# Altium integrated library VIETTIEN.IntLib: 194 symbols (part 7 of 9)

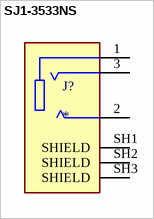
[diagram p138: symbol SJ1-3533NS]

## SJ1-3533NS
designator J?
3.50mm (0.141, 1/8, Mini Plug) - Headphone Phone Jack Stereo (3 Conductor, TRS) Connector Solder; MF: Same Sky; MP: SJ1-3533NS; SnapEDA_Link: https://www.snapeda.com/parts/SJ1-3533NS/Same+Sky/view-part/?ref=snap; Package: None; Value: *; Check_prices: https://www.snapeda.com/parts/SJ1-3533NS/Same+Sky/view-part/?ref=eda
footprint CUI_SJ1-3533NS
pins: 1, 2, 3, SH1 SHIELD, SH2 SHIELD, SH3 SHIELD


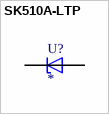
[diagram p139: symbol SK510A-LTP]

## SK510A-LTP
designator U?
Diode Schottky 100 V 5A Surface Mount DO-214AC (SMA)
footprint SK510A-LTP
pins: 1, 2


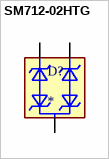
[diagram p140: symbol SM712-02HTG]

## SM712-02HTG
designator D?
TVS Diode, SM712 Series, 31V Clamp, 600W Peak Pulse, Surface Mount, SOT23-3 | Littelfuse SM712-02HTG; MF: Littelfuse Inc.; SnapEDA_Link: https://www.snapeda.com/parts/SM712-02HTG/Littelfuse/view-part/?ref=snap; Package: SOT-23 Littelfuse Inc.; Value: *; MP: SM712-02HTG; Check_prices: https://www.snapeda.com/parts/SM712-02HTG/Littelfuse/view-part/?ref=eda
footprint SOT23
pins: 1, 2, 3


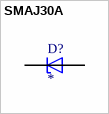
[diagram p141: symbol SMAJ30A]

## SMAJ30A
designator D?
400W, 35.1V, 5%, Unidirectional, TVS; MF: Taiwan Semiconductor; MP: SMAJ30A; SnapEDA_Link: https://www.snapeda.com/parts/SMAJ30A/taiwan/view-part/?ref=snap; Package: SMA-2 Taiwan Semiconductor; Value: *; Check_prices: https://www.snapeda.com/parts/SMAJ30A/taiwan/view-part/?ref=eda
footprint DIOM4325X250N
pins: A, C


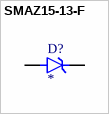
[diagram p142: symbol SMAZ15-13-F]

## SMAZ15-13-F
designator D?
MP: SMAZ15-13-F; Package: None; Price: None; Value: *; Availability: Unavailable
footprint DIOM5226X240N
pins: 1 K, 2 A


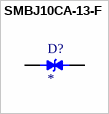
[diagram p143: symbol SMBJ10CA-13-F]

## SMBJ10CA-13-F
designator D?
MF: {'manufacturer': u'Diodes Incorporated'}; MP: SMBJ10CA-13-F; Package: None; Price: None; Value: *; Availability: Unavailable
footprint DIOM4336X265N
pins: 1, 2


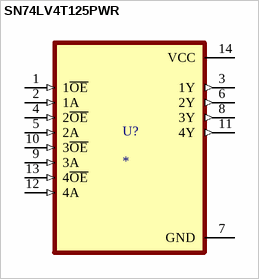
[diagram p144: symbol SN74LV4T125PWR]

## SN74LV4T125PWR
designator U?
Single Power Supply Quadruple Buffer GATE w/ 3-State Output CMOS Logic Level Shifter; MF: Texas Instruments; MP: SN74LV4T125PWR; SnapEDA_Link: https://www.snapeda.com/parts/SN74LV4T125PWR/Texas+Instruments/view-part/?ref=snap; Package: TSSOP-14 Texas Instruments; Value: *; Check_prices: https://www.snapeda.com/parts/SN74LV4T125PWR/Texas+Instruments/view-part/?ref=eda
footprint SOP65P640X120-14N
pins: 1 1~{OE} (in), 2 1A (in), 3 1Y (out), 4 2~{OE} (in), 5 2A (in), 6 2Y (out), 7 GND (power), 8 3Y (out), 9 3A (in), 10 3~{OE} (in), 11 4Y (out), 12 4A (in), 13 4~{OE} (in), 14 VCC (power)


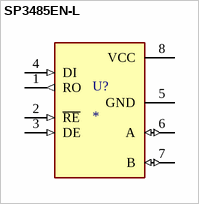
[diagram p145: symbol SP3485EN-L]

## SP3485EN-L
designator U?
1/1 Transceiver Half RS422, RS485 8-SOIC; MF: MaxLinear, Inc.; MP: SP3485EN-L; SnapEDA_Link: https://www.snapeda.com/parts/SP3485EN-L/MaxLinear/view-part/?ref=snap; Package: None; Value: *; Check_prices: https://www.snapeda.com/parts/SP3485EN-L/MaxLinear/view-part/?ref=eda
footprint SOIC127P599X175-8N
pins: 1 RO (out), 2 ~{RE} (in), 3 DE (in), 4 DI (in), 5 GND (power), 6 A (io), 7 B (io), 8 VCC (power)


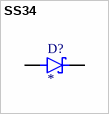
[diagram p146: symbol SS34]

## SS34
designator D?
3A, 40V, Schottky Rectifier; MF: Taiwan Semiconductor; MP: SS34; SnapEDA_Link: https://www.snapeda.com/parts/SS34/taiwan/view-part/?ref=snap; Package: DO-214AB-2 Taiwan Semiconductor; Value: *; Check_prices: https://www.snapeda.com/parts/SS34/taiwan/view-part/?ref=eda
footprint DIO_SS34
pins: A, C K


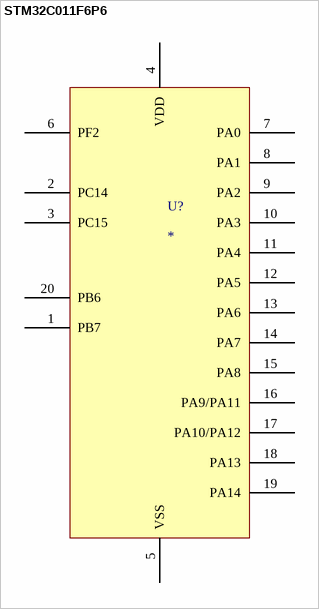
[diagram p147: symbol STM32C011F6P6]

## STM32C011F6P6
designator U?
ARM Microcontrollers - MCU Mainstream Arm Cortex-M0+ MCU 32 Kbytes Flash 6 Kbytes RAM 48 MHz CPU 2x USART / STM32C011F6P6
footprint SOIC65P640X120-20N
pins: 1 PB7, 2 PC14, 3 PC15, 4 VDD, 5 VSS, 6 PF2, 7 PA0, 8 PA1, 9 PA2, 10 PA3, 11 PA4, 12 PA5, 13 PA6, 14 PA7, 15 PA8, 16 PA9/PA11, 17 PA10/PA12, 18 PA13, 19 PA14, 20 PB6


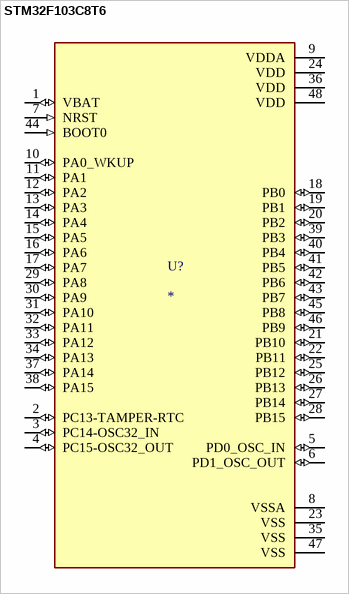
[diagram p148: symbol STM32F103C8T6]

## STM32F103C8T6
designator U?
ARM® Cortex®-M3 STM32F1 Microcontroller IC 32-Bit 72MHz 64KB (64K x 8) FLASH 48-LQFP (7x7); MF: STMicroelectronics; MP: STM32F103C8T6; SnapEDA_Link: https://www.snapeda.com/parts/STM32F103C8T6/STMicroelectronics/view-part/?ref=snap; Package: LQFP-48 STMicroelectronics; Value: *; Check_prices: https://www.snapeda.com/parts/STM32F103C8T6/STMicroelectronics/view-part/?ref=eda
footprint QFP50P900X900X160-48N
pins: 1 VBAT (io), 2 PC13-TAMPER-RTC (io), 3 PC14-OSC32_IN (io), 4 PC15-OSC32_OUT (io), 5 PD0_OSC_IN (io), 6 PD1_OSC_OUT (io), 7 NRST (in), 8 VSSA (power), 9 VDDA (power), 10 PA0_WKUP (io), 11 PA1 (io), 12 PA2 (io), 13 PA3 (io), 14 PA4 (io), 15 PA5 (io), 16 PA6 (io), 17 PA7 (io), 18 PB0 (io), 19 PB1 (io), 20 PB2 (io), 21 PB10 (io), 22 PB11 (io), 23 VSS (power), 24 VDD (power), 25 PB12 (io), 26 PB13 (io), 27 PB14 (io), 28 PB15 (io), 29 PA8 (io), 30 PA9 (io), 31 PA10 (io), 32 PA11 (io), 33 PA12 (io), 34 PA13 (io), 35 VSS (power), 36 VDD (power), 37 PA14 (io), 38 PA15 (io), 39 PB3 (io), 40 PB4 (io), 41 PB5 (io), 42 PB6 (io), 43 PB7 (io), 44 BOOT0 (in), 45 PB8 (io), 46 PB9 (io), 47 VSS (power), 48 VDD (power)


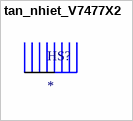
[diagram p149: symbol tan_nhiet_V7477X2]

## tan_nhiet_V7477X2
designator HS?
Extruded heatsink with solderpins - 11K/W - 38,1x35x12,7mm - black anodized - TOP-3, TO-220, SOT-32 retaining spring V03HK; MF: Assmann WSW Components; MP: V7477X2; SnapEDA_Link: https://www.snapeda.com/parts/V7477X2/Assmann+Electronics/view-part/?ref=snap; Package: None; Value: *; Check_prices: https://www.snapeda.com/parts/V7477X2/Assmann+Electronics/view-part/?ref=eda
footprint HSINK_V7477X2
pins: HS1 S, HS2 S


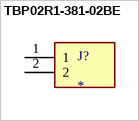
[diagram p150: symbol TBP02R1-381-02BE]

## TBP02R1-381-02BE
designator J?
2~24 Poles, Pluggable,Receptacle, Horizontal, 3.81 Pitch, Terminal Block Connector; MF: Same Sky; MP: TBP02R1-381-02BE; SnapEDA_Link: https://www.snapeda.com/parts/TBP02R1-381-02BE/Same+Sky/view-part/?ref=snap; Package: None; Value: *; Check_prices: https://www.snapeda.com/parts/TBP02R1-381-02BE/Same+Sky/view-part/?ref=eda
footprint CUI_TBP02R1-381-02BE
pins: 1, 2


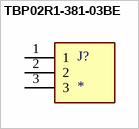
[diagram p151: symbol TBP02R1-381-03BE]

## TBP02R1-381-03BE
designator J?
2~24 Poles, Pluggable,Receptacle, Horizontal, 3.81 Pitch, Terminal Block Connector; MF: Same Sky; MP: TBP02R1-381-03BE; SnapEDA_Link: https://www.snapeda.com/parts/TBP02R1-381-03BE/Same+Sky/view-part/?ref=snap; Package: None; Value: *; Check_prices: https://www.snapeda.com/parts/TBP02R1-381-03BE/Same+Sky/view-part/?ref=eda
footprint CUI_TBP02R1-381-03BE
pins: 1, 2, 3


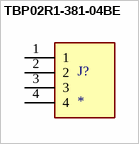
[diagram p152: symbol TBP02R1-381-04BE]

## TBP02R1-381-04BE
designator J?
2~24 Poles, Pluggable,Receptacle, Horizontal, 3.81 Pitch, Terminal Block Connector; MF: Same Sky; MP: TBP02R1-381-04BE; SnapEDA_Link: https://www.snapeda.com/parts/TBP02R1-381-04BE/Same+Sky/view-part/?ref=snap; Package: None; Value: *; Check_prices: https://www.snapeda.com/parts/TBP02R1-381-04BE/Same+Sky/view-part/?ref=eda
footprint CUI_TBP02R1-381-04BE
pins: 1, 2, 3, 4


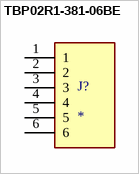
[diagram p153: symbol TBP02R1-381-06BE]

## TBP02R1-381-06BE
designator J?
2~24 Poles, Pluggable,Receptacle, Horizontal, 3.81 Pitch, Terminal Block Connector; MF: Same Sky; MP: TBP02R1-381-06BE; SnapEDA_Link: https://www.snapeda.com/parts/TBP02R1-381-06BE/Same+Sky/view-part/?ref=snap; Package: None; Value: *; Check_prices: https://www.snapeda.com/parts/TBP02R1-381-06BE/Same+Sky/view-part/?ref=eda
footprint CUI_TBP02R1-381-06BE
pins: 1, 2, 3, 4, 5, 6


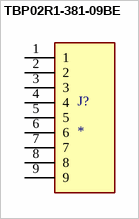
[diagram p154: symbol TBP02R1-381-09BE]

## TBP02R1-381-09BE
designator J?
2~24 Poles, Pluggable,Receptacle, Horizontal, 3.81 Pitch, Terminal Block Connector; MF: Same Sky; MP: TBP02R1-381-09BE; SnapEDA_Link: https://www.snapeda.com/parts/TBP02R1-381-09BE/Same+Sky/view-part/?ref=snap; Package: None; Value: *; Check_prices: https://www.snapeda.com/parts/TBP02R1-381-09BE/Same+Sky/view-part/?ref=eda
footprint CUI_TBP02R1-381-09BE
pins: 1, 2, 3, 4, 5, 6, 7, 8, 9


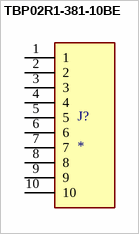
[diagram p155: symbol TBP02R1-381-10BE]

## TBP02R1-381-10BE
designator J?
2â€“24 Ð¿Ð¾Ð»ÑŽÑÐ°, Ð¿Ð¾Ð´ÐºÐ»ÑŽÑ‡Ð°ÐµÐ¼Ñ‹Ðµ, Ñ Ñ€Ð¾Ð·ÐµÑ‚ÐºÐ¾Ð¹, Ð³Ð¾Ñ€Ð¸Ð·Ð¾Ð½Ñ‚Ð°Ð»ÑŒÐ½Ñ‹Ðµ, Ñ ÑˆÐ°Ð³Ð¾Ð¼ 3,81, ÐºÐ»ÐµÐ¼Ð¼Ð½Ð°Ñ ÐºÐ¾Ð»Ð¾Ð´ÐºÐ°; MF: Same Sky; MP: TBP02R1-381-10BE; SnapEDA_Link: https://www.snapeda.com/parts/TBP02R1-381-10BE/Same+Sky/view-part/?ref=snap; Package: None; Value: *; Check_prices: https://www.snapeda.com/parts/TBP02R1-381-10BE/Same+Sky/view-part/?ref=eda
footprint CUI_TBP02R1-381-10BE
pins: 1, 2, 3, 4, 5, 6, 7, 8, 9, 10


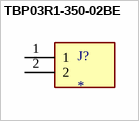
[diagram p156: symbol TBP03R1-350-02BE]

## TBP03R1-350-02BE
designator J?
2~24 Poles, Pluggable, Receptacle, Horizontal, 3.50 Pitch, Terminal Block Connector; MF: Same Sky; MP: TBP03R1-350-02BE; SnapEDA_Link: https://www.snapeda.com/parts/TBP03R1-350-02BE/Same+Sky/view-part/?ref=snap; Package: None; Value: *; Check_prices: https://www.snapeda.com/parts/TBP03R1-350-02BE/Same+Sky/view-part/?ref=eda
footprint CUI_TBP03R1-350-02BE
pins: 1, 2


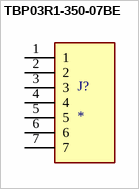
[diagram p157: symbol TBP03R1-350-07BE]

## TBP03R1-350-07BE
designator J?
2~24 Poles, Pluggable, Receptacle, Horizontal, 3.50 Pitch, Terminal Block Connector; MF: Same Sky; MP: TBP03R1-350-07BE; SnapEDA_Link: https://www.snapeda.com/parts/TBP03R1-350-07BE/Same+Sky/view-part/?ref=snap; Package: None; Value: *; Check_prices: https://www.snapeda.com/parts/TBP03R1-350-07BE/Same+Sky/view-part/?ref=eda
footprint CUI_TBP03R1-350-07BE
pins: 1, 2, 3, 4, 5, 6, 7


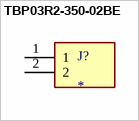
[diagram p158: symbol TBP03R2-350-02BE]

## TBP03R2-350-02BE
designator J?
2~24 Poles, Pluggable, Receptacle, Vertical, 3.50 Pitch, Terminal Block Connector; MF: Same Sky; MP: TBP03R2-350-02BE; SnapEDA_Link: https://www.snapeda.com/parts/TBP03R2-350-02BE/Same+Sky/view-part/?ref=snap; Package: None; Value: *; Check_prices: https://www.snapeda.com/parts/TBP03R2-350-02BE/Same+Sky/view-part/?ref=eda
footprint CUI_TBP03R2-350-02BE
pins: 1, 2


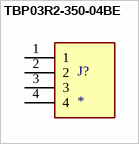
[diagram p159: symbol TBP03R2-350-04BE]

## TBP03R2-350-04BE
designator J?
2~24 Poles, Pluggable, Receptacle, Vertical, 3.50 Pitch, Terminal Block Connector; MF: Same Sky; MP: TBP03R2-350-04BE; SnapEDA_Link: https://www.snapeda.com/parts/TBP03R2-350-04BE/Same+Sky/view-part/?ref=snap; Package: None; Value: *; Check_prices: https://www.snapeda.com/parts/TBP03R2-350-04BE/Same+Sky/view-part/?ref=eda
footprint CUI_TBP03R2-350-04BE
pins: 1, 2, 3, 4


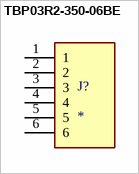
[diagram p160: symbol TBP03R2-350-06BE]

## TBP03R2-350-06BE
designator J?
2~24 Poles, Pluggable, Receptacle, Vertical, 3.50 Pitch, Terminal Block Connector; MF: Same Sky; MP: TBP03R2-350-06BE; SnapEDA_Link: https://www.snapeda.com/parts/TBP03R2-350-06BE/Same+Sky/view-part/?ref=snap; Package: None; Value: *; Check_prices: https://www.snapeda.com/parts/TBP03R2-350-06BE/Same+Sky/view-part/?ref=eda
footprint CUI_TBP03R2-350-06BE
pins: 1, 2, 3, 4, 5, 6
